# Altium schematic symbol library WSL2512R0100FEA.SchLib: 1 symbol
Pins are listed as number, name and electrical type; pins without a type are passive.

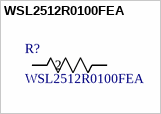
[diagram p0: symbol WSL2512R0100FEA]

## WSL2512R0100FEA
designator R?
WSL-2512 .01 1% EA e3; Manufacturer_Name: Vishay; Copyright: Copyright (C) 2026 Ultra Librarian. All rights reserved.; Manufacturer_Part_Number: WSL2512R0100FEA
footprint RES_2512_WSL
pins: 1, 2